# Altium schematic symbol library MIC39101-5.0YM-TR.SchLib: 1 symbol
Pins are listed as number, name and electrical type; pins without a type are passive.

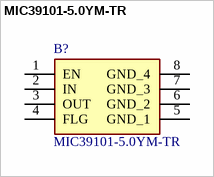
[diagram p0: symbol MIC39101-5.0YM-TR]

## MIC39101-5.0YM-TR
designator B?
LDO Voltage Regulators 1.0A 1.0% Fixed Voltage LDO; Manufacturer_Name: Microchip; Geometry.Height: 1.73mm; Manufacturer_Part_Number: MIC39101-5.0YM-TR; Mouser Part Number: 998-MIC39101-5.0YMTR; Mouser Price/Stock: https://www.mouser.co.uk/ProductDetail/Microchip-Technology-Micrel/MIC39101-50YM-TR?qs=U6T8BxXiZAW4%252Bcnkgk10yA%3D%3D; Arrow Part Number: *; Arrow Price/Stock: *; Datasheet Link: http://www.microchip.com/mymicrochip/filehandler.aspx?ddocname=en581613
footprint SOIC127P599X173-8N
pins: 1 EN, 2 IN, 3 OUT, 4 FLG, 5 GND_1, 6 GND_2, 7 GND_3, 8 GND_4